# Altium footprint library JST_S5B-XH-SM4-TB.PcbLib: 1 footprints
Each footprint in its own frame and in the unit in brackets; x right, y up, seen from the top. Pads: shape width x height; smd on the part's side, far side on the other; paste and mask are expansions set on the pad; w line width, h text height; cw(c..) or ccw(c..) is an arc to the next point about the centre after c.
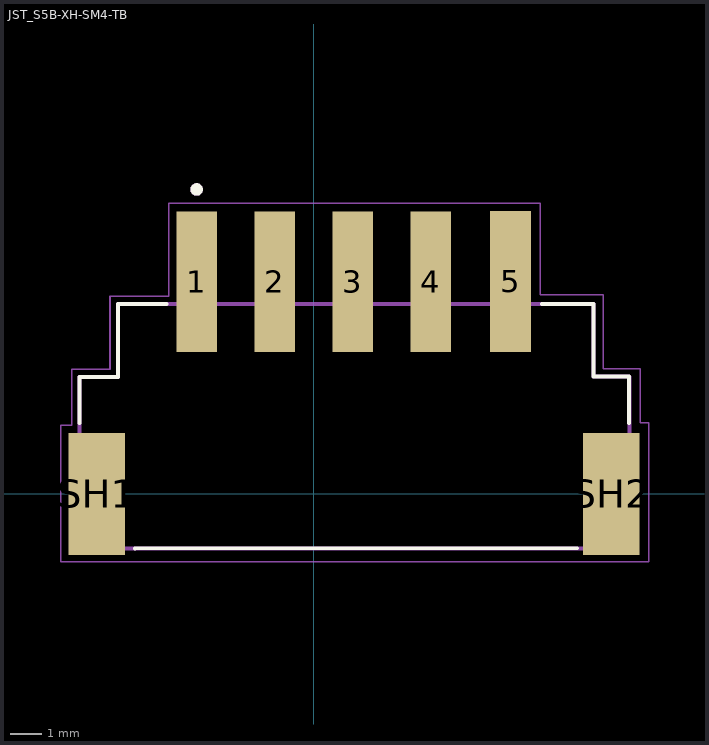
[diagram p0: the footprint, top view; thin cyan lines are the x and y axes]

## JST_S5B-XH-SM4-TB [mm]
height 6
pads (7):
  rect 1.3x4.5 smd: 1(-3.75,6.8) 2(-1.25,6.8) 3(1.25,6.8) 4(3.75,6.8) 5(6.3,6.804)
  rect 1.8x3.9 smd: SH1(-6.95,0) SH2(9.525,0)
Top Overlay:
  circle w0.2: c-3.75,9.75 r0.1
  lines w0.127: -7.5,2.27 -7.5,3.75 -6.275,3.75 -6.275,6.08 -4.72,6.08 ; -5.73,-1.75 8.425,-1.737 ; 7.301,6.085 8.952,6.085 8.952,3.755 10.095,3.755 10.095,2.275
Assembly Top:
  circle w0.2: c-3.75,9.75 r0.1
  lines w0.127: 8.952,6.08 -6.275,6.08 -6.275,3.75 -7.5,3.75 -7.5,-1.75 10.106,-1.75 10.106,3.75 ; 8.952,6.085 8.952,3.755 10.095,3.755
Courtyard Top:
  lines w0.05: -4.65,9.3 -4.65,6.33 -6.525,6.33 -6.525,4 -7.75,4 -7.75,2.2 -8.1,2.2 -8.1,-2.166 10.731,-2.166 10.731,2.286 10.455,2.286 10.455,4.017 ; -4.648,9.306 7.249,9.306 7.249,6.377 9.271,6.377 9.271,4.01 10.455,4.01